# Altium footprint library SOIC.PcbLib: 10 footprints
Each footprint in its own frame and in the unit in brackets; x right, y up, seen from the top. Pads: shape width x height; smd on the part's side, far side on the other; paste and mask are expansions set on the pad; w line width, h text height; cw(c..) or ccw(c..) is an arc to the next point about the centre after c.
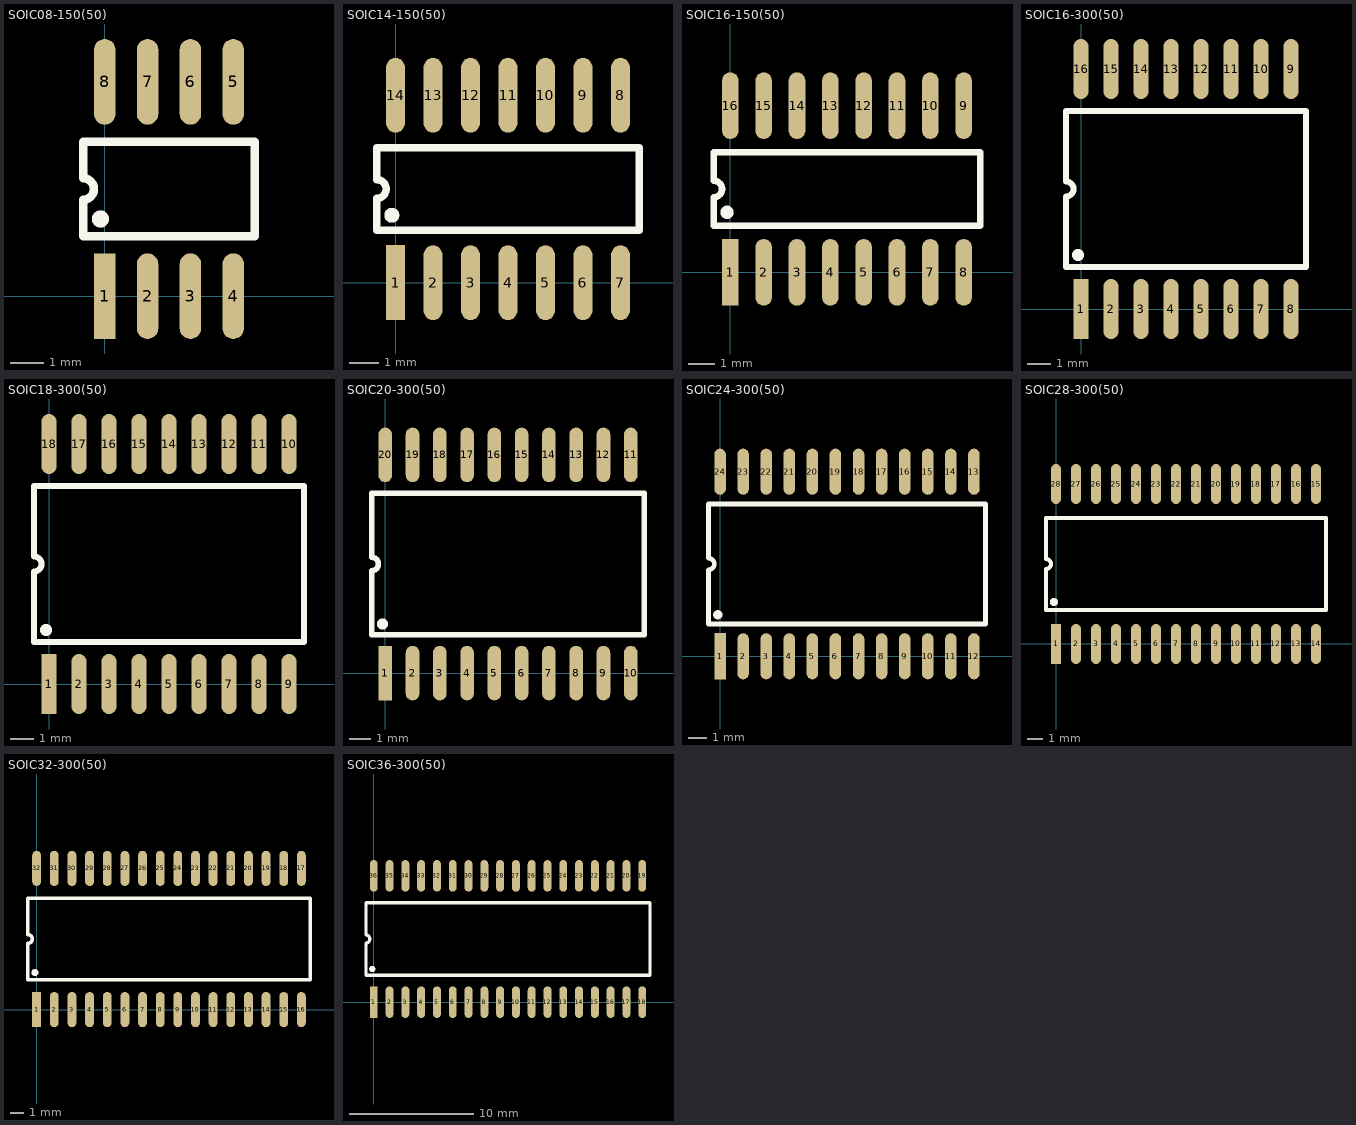
[diagram p0: the footprints below, top view; thin cyan lines are the x and y axes]

## SOIC08-150(50) [mil] "SOIC 8 Leads; Row Spacing 3.81 mm; Pitch 1.27 mm; 3D André L´Hérault"
height 70
pads (8):
  rect 25x100 smd: 1(0,0)
  oval 25x100 smd: 2(50,0) 3(100,0) 4(150,0) 5(150,250) 6(100,250) 7(50,250) 8(0,250)
Top Overlay:
  circle w10: c-5,90 r5
  lines w10: -25,70 -25,112.5 ccw(c-25,125) -25,137.5 -25,180 175,180 175,70 -25,70
3D body "SOIC08-150(50)).step": height 74.02, standoff 0, extent -20,5.79 174.88,244.21

## SOIC14-150(50) [mil] "SOIC 14 Leads; Row Spacing 3.81 mm; Pitch 1.27 mm; 3D André L´Hérault"
height 70
pads (14):
  rect 25x100 smd: 1(0,0)
  oval 25x100 smd: 2(50,0) 3(100,0) 4(150,0) 5(200,0) 6(250,0) 7(300,0) 8(300,250) 9(250,250) 10(200,250) 11(150,250) 12(100,250) 13(50,250) 14(0,250)
Top Overlay:
  circle w10: c-5,90 r5
  lines w10: -25,70 325,70 325,180 -25,180 -25,137.5 cw(c-25,125) -25,112.5 -25,70
3D body "SOIC14-150(50).step": height 62.99, standoff 0, extent -19.49,4 325,242.41

## SOIC16-150(50) [mil] "SOIC 16 Leads; Row Spacing 3.81 mm; Pitch 1.27 mm; 3D André L´Hérault"
height 70
pads (16):
  rect 25x100 smd: 1(0,0)
  oval 25x100 smd: 2(50,0) 3(100,0) 4(150,0) 5(200,0) 6(250,0) 7(300,0) 8(350,0) 9(350,250) 10(300,250) 11(250,250) 12(200,250) 13(150,250) 14(100,250) 15(50,250) 16(0,250)
Top Overlay:
  circle w10: c-5,90 r5
  lines w10: -25,70 -25,112.5 ccw(c-25,125) -25,137.5 -25,180 375,180 375,70 -25,70
3D body "SOIC16-150(50).step": height 64.96, standoff 0, extent -19.7,4 374,242.41

## SOIC16-300(50) [mil] "SOIC 16 Leads; Row Spacing 7.62 mm; Pitch 1.27 mm; 3D André L´Hérault"
height 110
pads (16):
  rect 25x100 smd: 1(0,0)
  oval 25x100 smd: 2(50,0) 3(100,0) 4(150,0) 5(200,0) 6(250,0) 7(300,0) 8(350,0) 9(350,400) 10(300,400) 11(250,400) 12(200,400) 13(150,400) 14(100,400) 15(50,400) 16(0,400)
Top Overlay:
  circle w10: c-5,90 r5
  lines w10: -25,212.5 cw(c-25,200) -25,187.5 -25,70 375,70 375,330 -25,330 ; -25,215 -25,327.5
3D body "SOIC16-300(50).step": height 145.67, standoff 0, extent -31.42,-6.21 380,406.21

## SOIC18-300(50) [mil] "SOIC 18 Leads; Row Spacing 7.62 mm; Pitch 1.27 mm; 3D André L´Hérault"
height 110
pads (18):
  rect 25x100 smd: 1(0,0)
  oval 25x100 smd: 2(50,0) 3(100,0) 4(150,0) 5(200,0) 6(250,0) 7(300,0) 8(350,0) 9(400,0) 10(400,400) 11(350,400) 12(300,400) 13(250,400) 14(200,400) 15(150,400) 16(100,400) 17(50,400) 18(0,400)
Top Overlay:
  circle w10: c-5,90 r5
  lines w10: -25,212.5 cw(c-25,200) -25,187.5 -25,70 425,70 425,330 -25,330 ; -25,215 -25,327.5
3D body "SOIC18-300(50).step": height 110.24, standoff 0, extent -32.6,-5 430,403.49

## SOIC20-300(50) [mil] "SOIC 20 Leads; Row Spacing 7.62 mm; Pitch 1.27 mm; 3D André L´Hérault"
height 110
pads (20):
  rect 25x100 smd: 1(0,0)
  oval 25x100 smd: 2(50,0) 3(100,0) 4(150,0) 5(200,0) 6(250,0) 7(300,0) 8(350,0) 9(400,0) 10(450,0) 11(450,400) 12(400,400) 13(350,400) 14(300,400) 15(250,400) 16(200,400) 17(150,400) 18(100,400) 19(50,400) 20(0,400)
Top Overlay:
  circle w10: c-5,90 r5
  lines w10: -25,212.5 cw(c-25,200) -25,187.5 -25,70 475,70 475,330 -25,330 ; -25,215 -25,327.5
3D body "SOIC20-300(100).step": height 173.23, standoff 0, extent -30.91,-5 480.91,407.43

## SOIC24-300(50) [mil] "SOIC 24 Leads; Row Spacing 7.62 mm; Pitch 1.27 mm; 3D André L´Hérault"
height 110
pads (24):
  rect 25x100 smd: 1(0,0)
  oval 25x100 smd: 2(50,0) 3(100,0) 4(150,0) 5(200,0) 6(250,0) 7(300,0) 8(350,0) 9(400,0) 10(450,0) 11(500,0) 12(550,0) 13(550,400) 14(500,400) 15(450,400) 16(400,400) 17(350,400) 18(300,400) 19(250,400) 20(200,400) 21(150,400) 22(100,400) 23(50,400) 24(0,400)
Top Overlay:
  circle w10: c-5,90 r5
  lines w10: -25,212.5 cw(c-25,200) -25,187.5 -25,70 575,70 575,330 -25,330 ; -25,215 -25,327.5
3D body "SOIC24-300(50).step": height 109.84, standoff 0, extent -37.01,-10 587.01,404.4

## SOIC28-300(50) [mil] "SOIC 28 Leads; Row Spacing 7.62 mm; Pitch 1.27 mm; 3D André L´Hérault"
height 110
pads (28):
  rect 25x100 smd: 1(0,0)
  oval 25x100 smd: 2(50,0) 3(100,0) 4(150,0) 5(200,0) 6(250,0) 7(300,0) 8(350,0) 9(400,0) 10(450,0) 11(500,0) 12(550,0) 13(600,0) 14(650,0) 15(650,400) 16(600,400) 17(550,400) 18(500,400) 19(450,400) 20(400,400) 21(350,400) 22(300,400) 23(250,400) 24(200,400) 25(150,400) 26(100,400) 27(50,400) 28(0,400)
Top Overlay:
  circle w10: c-5,105 r5
  lines w10: -25,85 675,85 675,315 -25,315 -25,212.5 cw(c-25,200) -25,187.5 -25,85
3D body "SOIC28-300(50).step": height 109.84, standoff 0, extent -37.01,-5 687.01,409.4

## SOIC32-300(50) [mil] "SOIC 32 Leads; Row Spacing 7.62 mm; Pitch 1.27 mm; 3D André L´Hérault"
height 110
pads (32):
  rect 25x100 smd: 1(0,0)
  oval 25x100 smd: 2(50,0) 3(100,0) 4(150,0) 5(200,0) 6(250,0) 7(300,0) 8(350,0) 9(400,0) 10(450,0) 11(500,0) 12(550,0) 13(600,0) 14(650,0) 15(700,0) 16(750,0) 17(750,400) 18(700,400) 19(650,400) 20(600,400) 21(550,400) 22(500,400) 23(450,400) 24(400,400) 25(350,400) 26(300,400) 27(250,400) 28(200,400) 29(150,400) 30(100,400) 31(50,400) 32(0,400)
Top Overlay:
  circle w10: c-5,105 r5
  lines w10: -25,85 -25,187.5 ccw(c-25,200) -25,212.5 -25,315 775,315 775,85 -25,85
3D body "SOIC32-300(50).step": height 109.84, standoff 0, extent -34.02,-2.2 790,412.2

## SOIC36-300(50) [mil] "SOIC 36 Leads; Row Spacing 7.62 mm; Pitch 1.27 mm; 3D André L´Hérault"
height 110
pads (36):
  rect 25x100 smd: 1(0,0)
  oval 25x100 smd: 2(50,0) 3(100,0) 4(150,0) 5(200,0) 6(250,0) 7(300,0) 8(350,0) 9(400,0) 10(450,0) 11(500,0) 12(550,0) 13(600,0) 14(650,0) 15(700,0) 16(750,0) 17(800,0) 18(850,0) 19(850,400) 20(800,400) 21(750,400) 22(700,400) 23(650,400) 24(600,400) 25(550,400) 26(500,400) 27(450,400) 28(400,400) 29(350,400) 30(300,400) 31(250,400) 32(200,400) 33(150,400) 34(100,400) 35(50,400) 36(0,400)
Top Overlay:
  circle w10: c-5,105 r5
  lines w10: -25,85 -25,187.5 ccw(c-25,200) -25,212.5 -25,315 875,315 875,85 -25,85
3D body "SOIC36-300(50).step": height 109.84, standoff 0, extent -39.02,-7.2 885,407.2